# Altium footprint library Library_Mecatronica.PcbLib: 20 footprints (part 2 of 2)
Each footprint in its own frame and in the unit in brackets; x right, y up, seen from the top. Pads: shape width x height; smd on the part's side, far side on the other; paste and mask are expansions set on the pad; w line width, h text height; cw(c..) or ccw(c..) is an arc to the next point about the centre after c.
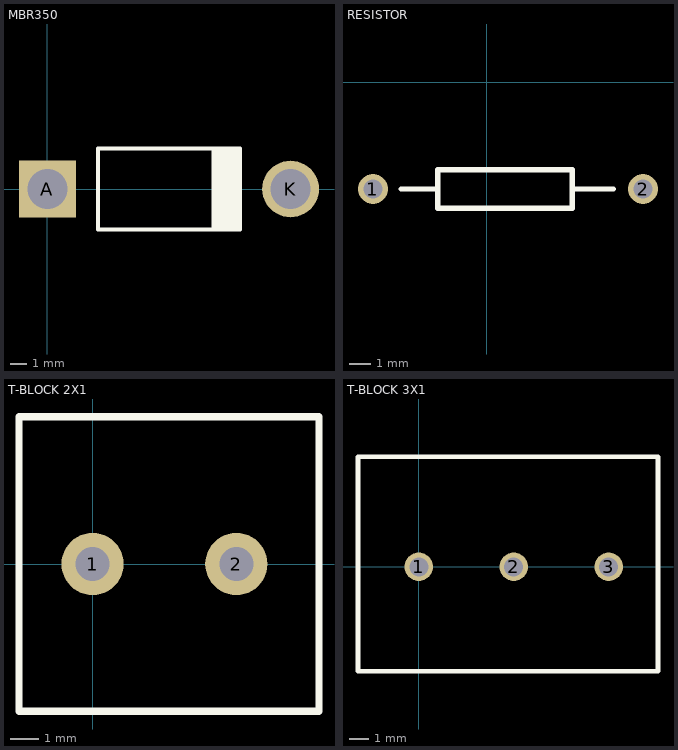
[diagram p1: the footprints below, top view; thin cyan lines are the x and y axes]

## MBR350 [mil]
pads (2):
  rect 140x140 hole 98.43: A(0,0)
  round 140 hole 98.43: K(600,0)
Top Overlay:
  rectangle: 405,-100 475,100
  lines w10: 125,-100 475,-100 475,100 125,100 125,-100
3D body "DO-201AD.step": height 239.21, standoff -217.48, extent -25,-110.24 626.97,110.24

## RESISTOR [mm] "RESISTOR AXIAL"
pads (2):
  round 1.4 hole 0.9: 1(-5.325,-5) 2(7.3,-5)
Top Overlay:
  lines w0.254: -4,-5 -2.4,-5 ; 5.9,-5 5.5,-5 4,-5 ; 4,-5 4,-4.1 -2.3,-4.1 -2.3,-5.9 4,-5.9 4,-5
3D body "User Library-Res50-Axial 0_5W-10K.STEP": height 5.38, standoff -4, extent -5.725,-6.875 7.725,-3.125

## T-BLOCK 2X1 [mm]
pads (2):
  round 2.2 hole 1.2: 1(0,0) 2(5.08,0)
Top Overlay:
  lines w0.254: -2.6,-5.2 8,-5.2 8,5.2 -2.6,5.2 -2.6,-5.2
3D body "User Library-DG128-5_0-02P-14.STEP": height 14.3, standoff -3.5, extent -2.5,-5.1 7.8,5.1

## T-BLOCK 3X1 [mm]
pads (3):
  round 1.5 hole 1: 1(0,0) 2(5,0) 3(10,0)
Top Overlay:
  lines w0.254: -3.2,-5.5 12.6,-5.5 12.6,5.8 -3.2,5.8 -3.2,-5.5
3D body "50188.stp": height 20.3, standoff -3, extent -3.205,-5.4 12.605,5.8